# EAGLE library part TPS22975DSGR (library TPS22975DSGR)
5.7V, 6A, 16m Load Switch with Adjustable Rise Time & Optional QOD for Cost-Conscious Applications Source: Datasheet <http://www.ti.com/lit/gpn/tps22975>
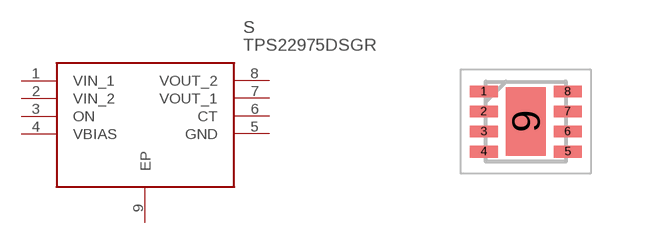
[diagram p0: symbol with the pads of SON50P200X200X80-9N; footprint SON50P200X200X80-9N]

Designator prefix S

## TPS22975DSGR (Arrow_Part_Number: TPS22975DSGR; Arrow_Price-Stock: https://www.arrow.com/en/products/tps22975dsgr/texas-instruments?utm_currency=USD&region=nac; Description: 5.7V, 6A, 16m Load Switch with Adjustable Rise Time & Optional QOD for Cost-Conscious Applications; Height: 0.8mm; Manufacturer_Name: Texas Instruments; Manufacturer_Part_Number: TPS22975DSGR; Mouser_Part_Number: 595-TPS22975DSGR; Mouser_Price-Stock: https://www.mouser.co.uk/ProductDetail/Texas-Instruments/TPS22975DSGR?qs=zEmsApcVOkXVZ0HZtWdfyQ%3D%3D)  [SON50P200X200X80-9N]
1  VIN_1
2  VIN_2
3  ON
4  VBIAS
5  GND
6  CT
7  VOUT_1
8  VOUT_2
9  EP

## Footprint SON50P200X200X80-9N (pad centres in mm)
DSG0008A 1
smd 0.7 x 0.3: 1 -1.05,0.75; 2 -1.05,0.25; 3 -1.05,-0.25; 4 -1.05,-0.75; 5 1.05,-0.75; 6 1.05,-0.25; 7 1.05,0.25; 8 1.05,0.75
smd 1 x 1.7: 9 0,0